# Altium footprint library conn.PcbLib: 101 footprints (part 4 of 7)
Each footprint in its own frame and in the unit in brackets; x right, y up, seen from the top. Pads: shape width x height; smd on the part's side, far side on the other; paste and mask are expansions set on the pad; w line width, h text height; cw(c..) or ccw(c..) is an arc to the next point about the centre after c.
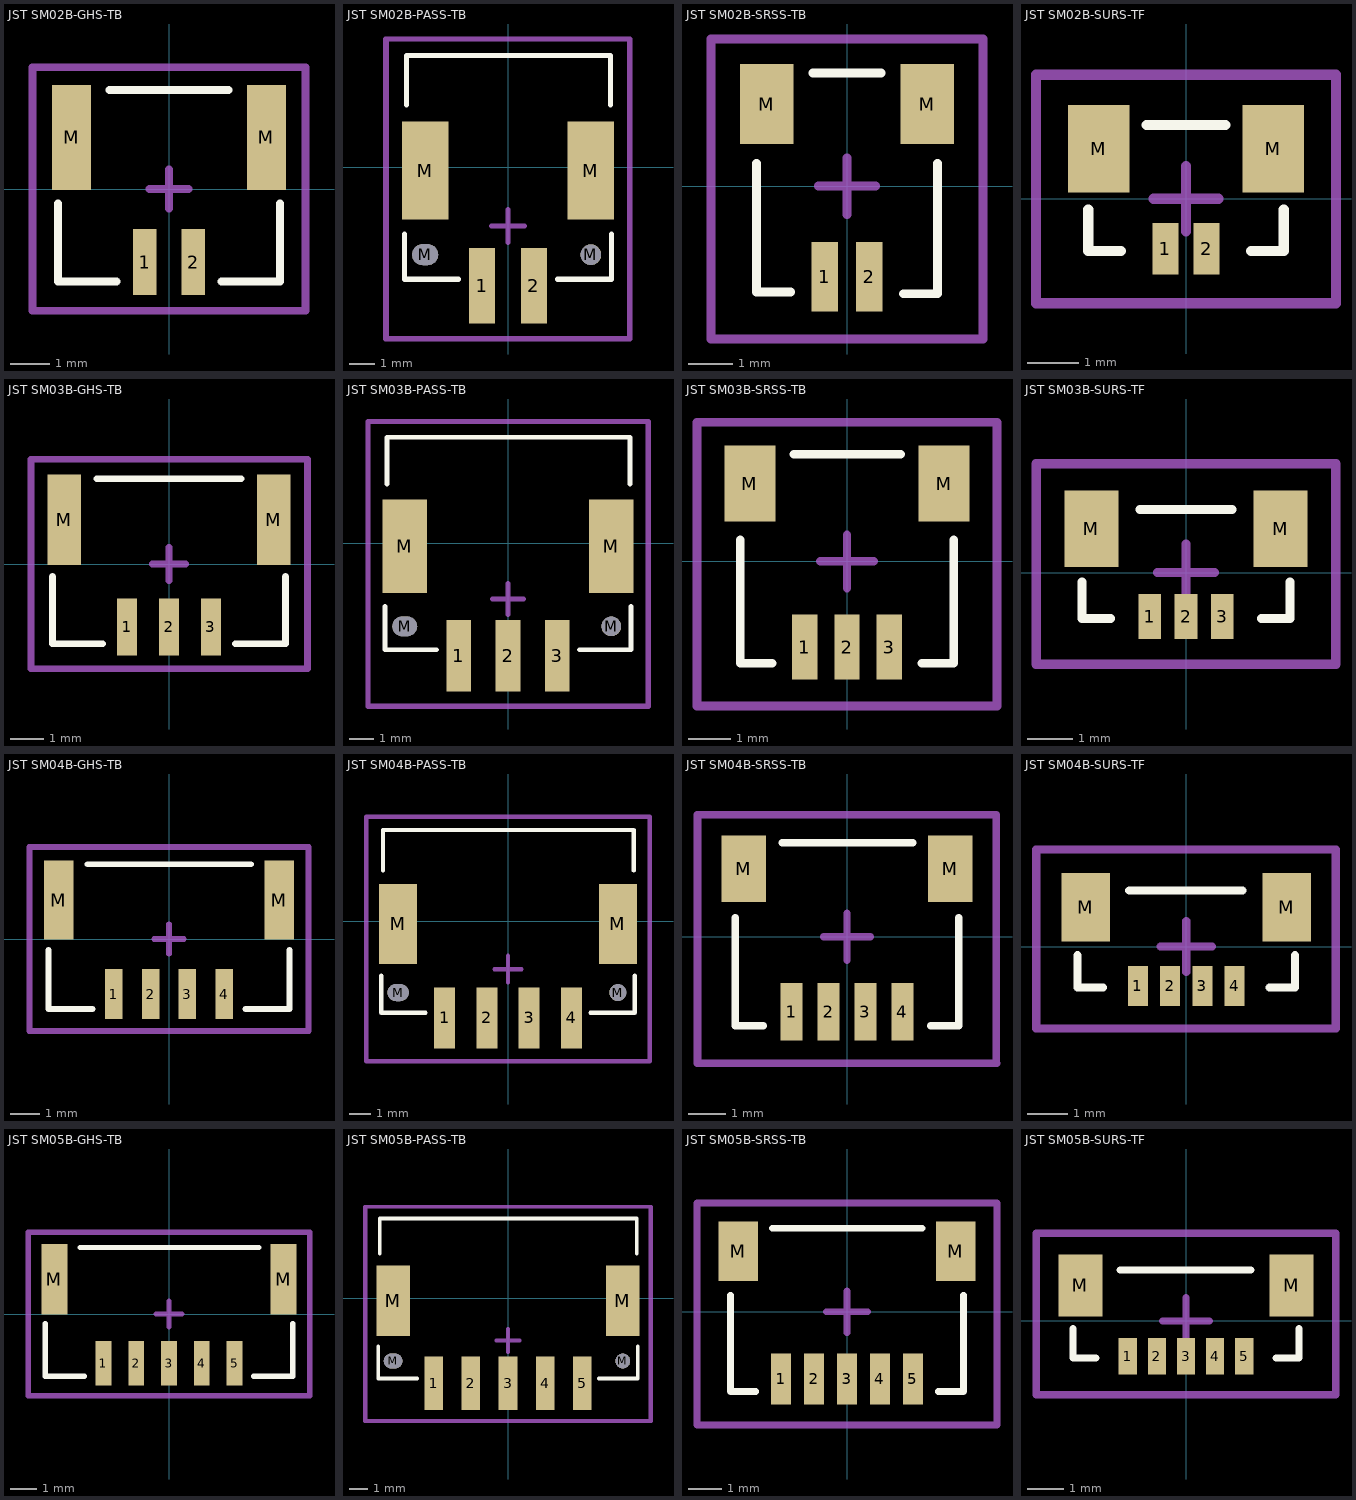
[diagram p3: the footprints below, top view; thin cyan lines are the x and y axes]

## JST SM02B-GHS-TB [mm] "1.25mm pitch/Disconnectable Crimp style connectors"
height 4.35
pads (4):
  rect 0.6x1.7 smd: 1(-0.625,-1.875) 2(0.625,-1.875)
  rect 1x2.7 smd: M(-2.5,1.325) M(2.5,1.325)
Top Overlay:
  lines w0.2: -2.85,-0.375 -2.85,-2.375 -1.35,-2.375 ; -1.524,2.54 1.524,2.54 ; 1.35,-2.375 2.85,-2.375 2.85,-0.375
Top Component:
  lines w0.203: -3.505,-3.124 3.505,-3.124 3.505,3.124 -3.505,3.124 -3.505,-3.124
  text ".Designator" at -0.813,-0.559 h2.03
Component Center:
  lines w0.2: -0.5,0 0.5,0 ; 0,-0.5 0,0.5 ; -3.5,-3.125 3.5,-3.125 3.5,3.125 -3.5,3.125 -3.5,-3.125
3D body "JST SM02B-GHS-TB.STEP": height 4.25, standoff -0.1, extent -2.875,-2.35 2.875,2.5

## JST SM02B-PASS-TB [mm] "JST PA Series 2mm pitch, side entry connector"
height 5.7
pads (6):
  rect 1x2.9 smd: 1(-1,-4.575) 2(1,-4.575)
  oval 1x0.8 hole 0.8 slot 1 at 0 deg unplated mask+0.102: M(-3.2,-3.375)
  rect 1.8x3.8 smd: M(-3.2,-0.125) M(3.2,-0.125)
  round 0.8 hole 0.8 unplated mask+0.102: M(3.2,-3.375)
Top Overlay:
  lines w0.2: -4,-2.575 -4,-4.325 -1.905,-4.325 ; -3.921,2.41 -3.921,4.315 3.953,4.315 3.953,2.41 ; 1.905,-4.325 4,-4.325 4,-2.575
Top Component:
  lines w0.203: -4.724,-6.629 4.699,-6.629 4.699,4.953 -4.724,4.953 -4.724,-6.629
  text ".Designator" at 0.559,-0.813 h2.03
Component Center:
  lines w0.2: -0.635,-2.265 0.635,-2.265 ; 0,-2.9 0,-1.63 ; -4.699,-6.607 -4.699,4.953 4.699,4.953 4.699,-6.607 -4.699,-6.607
3D body "JST SM02B-PASS-TB.STEP": height 5.8, standoff 0, extent -4,-5.641 4,4.359

## JST SM02B-SRSS-TB [mm] "1.0mm pitch/Disconnectable Crimp style connector"
height 2.95
pads (4):
  rect 0.6x1.55 smd: 1(-0.5,-2.032) 2(0.5,-2.032)
  rect 1.2x1.8 smd: M(-1.8,1.843) M(1.8,1.843)
Top Overlay:
  lines w0.2: -2.032,0.508 -2.032,-2.372 -1.27,-2.372 ; -0.762,2.54 0.762,2.54 ; 1.27,-2.413 2.032,-2.413 2.032,0.508
Top Component:
  lines w0.203: -3.048,-3.429 -3.048,3.302 3.048,3.302 3.048,-3.429 -3.048,-3.429
  text ".Designator" at -0.813,-0.559 h2.03
Component Center:
  lines w0.2: -0.635,0 0.635,0 ; 0,-0.635 0,0.635 ; -3.048,-3.429 -3.048,3.302 3.048,3.302 3.048,-3.429 -3.048,-3.429
3D body "JST SM02B-SRSS-TB.STEP": height 2.95, standoff -0.01, extent -2,-2.383 2,2.567

## JST SM02B-SURS-TF [mm] "1.0mm pitch/Disconnectable Crimp style connector"
height 2.95
pads (4):
  rect 0.5x1 smd: 1(-0.4,-0.975) 2(0.4,-0.975)
  rect 1.2x1.7 smd: M(-1.7,0.975) M(1.7,0.975)
Top Overlay:
  lines w0.2: -1.905,-0.213 -1.905,-1.016 -1.27,-1.016 ; -0.762,1.438 0.762,1.438 ; 1.27,-1.016 1.905,-1.016 1.905,-0.213
Top Component:
  lines w0.203: -2.921,-2.032 -2.921,2.413 2.921,2.413 2.921,-2.032 -2.921,-2.032
  text ".Designator" at -0.813,-0.559 h2.03
Component Center:
  lines w0.2: -0.635,0 0.635,0 ; 0,-0.635 0,0.635 ; -2.921,-2.032 -2.921,2.413 2.921,2.413 2.921,-2.032 -2.921,-2.032
3D body "JST SM02B-SURS-TF.STEP": height 1.75, standoff 0, extent -1.9,-1.262 1.9,1.438

## JST SM03B-GHS-TB [mm] "1.25mm pitch/Disconnectable Crimp style connectors"
height 4.35
pads (5):
  rect 0.6x1.7 smd: 1(-1.25,-1.875) 2(0,-1.875) 3(1.25,-1.875)
  rect 1x2.7 smd: M(-3.125,1.325) M(3.125,1.325)
Top Overlay:
  lines w0.2: -3.475,-0.375 -3.475,-2.375 -1.975,-2.375 ; -2.149,2.54 2.159,2.54 ; 1.975,-2.375 3.475,-2.375 3.475,-0.375
Top Component:
  lines w0.203: -4.115,-3.124 4.14,-3.124 4.14,3.124 -4.115,3.124 -4.115,-3.124
  text ".Designator" at -0.813,-0.559 h2.03
Component Center:
  lines w0.2: -0.5,0 0.5,0 ; 0,-0.5 0,0.5 ; -4.125,-3.125 -4.125,3.125 4.125,3.125 4.125,-3.125 -4.125,-3.125
3D body "JST SM03B-GHS-TB.STEP": height 4.35, standoff 0, extent -3.5,-2.31 3.5,2.54

## JST SM03B-PASS-TB [mm] "JST PA Series 2mm pitch, side entry connector"
height 5.7
pads (7):
  rect 1x2.9 smd: 1(-2,-4.575) 2(0,-4.575) 3(2,-4.575)
  oval 1x0.8 hole 0.8 slot 1 at 0 deg unplated mask+0.102: M(-4.2,-3.375)
  rect 1.8x3.8 smd: M(-4.2,-0.125) M(4.2,-0.125)
  round 0.8 hole 0.8 unplated mask+0.102: M(4.2,-3.375)
Top Overlay:
  lines w0.2: -5,-2.575 -5,-4.325 -2.905,-4.325 ; -4.921,2.41 -4.921,4.315 4.953,4.315 4.953,2.41 ; 2.905,-4.325 5,-4.325 5,-2.575
Top Component:
  lines w0.203: -5.69,-6.629 -5.69,4.953 5.715,4.953 5.715,-6.629 -5.69,-6.629
  text ".Designator" at -0.813,-0.559 h2.03
Component Center:
  lines w0.2: -0.635,-2.265 0.635,-2.265 ; 0,-2.9 0,-1.63 ; -5.699,-6.607 -5.699,4.953 5.699,4.953 5.699,-6.607 -5.699,-6.607
3D body "JST SM03B-PASS-TB.STEP": height 5.8, standoff 0, extent -5,-5.641 5,4.359

## JST SM03B-SRSS-TB [mm] "1.0mm pitch/Disconnectable Crimp style connector"
height 2.95
pads (5):
  rect 0.6x1.55 smd: 1(-1,-2.032) 2(0,-2.032) 3(1,-2.032)
  rect 1.2x1.8 smd: M(-2.3,1.843) M(2.3,1.843)
Top Overlay:
  lines w0.2: -2.532,0.508 -2.532,-2.413 -1.77,-2.413 ; -1.262,2.54 1.27,2.54 ; 1.77,-2.413 2.532,-2.413 2.532,0.508
Top Component:
  lines w0.203: -3.556,-3.429 3.556,-3.429 3.556,3.302 -3.556,3.302 -3.556,-3.429
  text ".Designator" at -0.813,-0.559 h2.03
Component Center:
  lines w0.2: -0.635,0 0.635,0 ; 0,-0.635 0,0.635 ; -3.548,-3.429 -3.548,3.302 3.548,3.302 3.548,-3.429 -3.548,-3.429
3D body "JST SM03B-SRSS-TB.STEP": height 2.95, standoff -0.01, extent -2.5,-2.383 2.5,2.567

## JST SM03B-SURS-TF [mm] "1.0mm pitch/Disconnectable Crimp style connector"
height 2.95
pads (5):
  rect 0.5x1 smd: 1(-0.8,-0.975) 2(0,-0.975) 3(0.8,-0.975)
  rect 1.2x1.7 smd: M(-2.1,0.975) M(2.1,0.975)
Top Overlay:
  lines w0.2: -2.305,-0.213 -2.305,-1.016 -1.67,-1.016 ; -1.016,1.397 1.016,1.397 ; 1.67,-1.016 2.305,-1.016 2.305,-0.213
Top Component:
  lines w0.203: -3.327,-2.032 3.327,-2.032 3.327,2.413 -3.327,2.413 -3.327,-2.032
  text ".Designator" at -0.813,-0.559 h2.03
Component Center:
  lines w0.2: -0.635,0 0.635,0 ; 0,-0.635 0,0.635 ; -3.321,-2.032 -3.321,2.413 3.321,2.413 3.321,-2.032 -3.321,-2.032
3D body "JST SM03B-SURS-TF.STEP": height 1.75, standoff 0, extent -2.3,-1.243 2.3,1.457

## JST SM04B-GHS-TB [mm] "1.25mm pitch/Disconnectable Crimp style connectors"
height 4.35
pads (6):
  rect 0.6x1.7 smd: 1(-1.875,-1.875) 2(-0.625,-1.875) 3(0.625,-1.875) 4(1.875,-1.875)
  rect 1x2.7 smd: M(-3.75,1.325) M(3.75,1.325)
Top Overlay:
  lines w0.2: -4.1,-0.375 -4.1,-2.375 -2.6,-2.375 ; -2.774,2.54 2.794,2.54 ; 2.6,-2.375 4.1,-2.375 4.1,-0.375
Top Component:
  lines w0.203: -4.75,-3.124 4.75,-3.124 4.75,3.124 -4.75,3.124 -4.75,-3.124
  text ".Designator" at -0.813,-0.559 h2.03
Component Center:
  lines w0.2: -0.5,0 0.5,0 ; 0,-0.5 0,0.5 ; -4.75,-3.125 -4.75,3.125 4.75,3.125 4.75,-3.125 -4.75,-3.125
3D body "JST SM04B-GHS-TB.STEP": height 4.35, standoff 0, extent -4.125,-2.31 4.125,2.54

## JST SM04B-PASS-TB [mm] "JST PA Series 2mm pitch, side entry connector"
height 5.7
pads (8):
  rect 1x2.9 smd: 1(-3,-4.575) 2(-1,-4.575) 3(1,-4.575) 4(3,-4.575)
  oval 1x0.8 hole 0.8 slot 1 at 0 deg unplated mask+0.102: M(-5.2,-3.375)
  rect 1.8x3.8 smd: M(-5.2,-0.125) M(5.2,-0.125)
  round 0.8 hole 0.8 unplated mask+0.102: M(5.2,-3.375)
Top Overlay:
  lines w0.2: -6,-2.575 -6,-4.325 -3.905,-4.325 ; -5.921,2.41 -5.921,4.315 5.953,4.315 5.953,2.41 ; 3.905,-4.325 6,-4.325 6,-2.575
Top Component:
  lines w0.203: -6.706,-6.629 6.706,-6.629 6.706,4.953 -6.706,4.953 -6.706,-6.629
  text ".Designator" at -0.813,-0.559 h2.03
Component Center:
  lines w0.2: -0.635,-2.265 0.635,-2.265 ; 0,-2.9 0,-1.63 ; 6.68,4.953 -6.699,4.953 -6.699,-6.607 6.699,-6.607 6.699,4.953
3D body "JST SM04B-PASS-TB.STEP": height 5.8, standoff 0, extent -6,-5.641 6,4.359

## JST SM04B-SRSS-TB [mm] "1.0mm pitch/Disconnectable Crimp style connector"
height 2.95
pads (6):
  rect 0.6x1.55 smd: 1(-1.5,-2.032) 2(-0.5,-2.032) 3(0.5,-2.032) 4(1.5,-2.032)
  rect 1.2x1.8 smd: M(-2.8,1.843) M(2.8,1.843)
Top Overlay:
  lines w0.2: -3.032,0.508 -3.032,-2.413 -2.27,-2.413 ; -1.762,2.54 1.778,2.54 ; 2.27,-2.413 3.032,-2.413 3.032,0.508
Top Component:
  lines w0.203: -4.064,-3.429 4.039,-3.429 4.039,3.302 -4.064,3.302 -4.064,-3.429
  text ".Designator" at -0.813,-0.559 h2.03
Component Center:
  lines w0.2: -0.635,0 0.635,0 ; 0,-0.635 0,0.635 ; 4.048,-3.429 4.048,3.302 -4.048,3.302 -4.048,-3.429 4.064,-3.429
3D body "JST SM04B-SRSS-TB.STEP": height 2.95, standoff -0.01, extent -3,-2.383 3,2.567

## JST SM04B-SURS-TF [mm] "1.0mm pitch/Disconnectable Crimp style connector"
height 2.95
pads (6):
  rect 0.5x1 smd: 1(-1.2,-0.975) 2(-0.4,-0.975) 3(0.4,-0.975) 4(1.2,-0.975)
  rect 1.2x1.7 smd: M(-2.5,0.975) M(2.5,0.975)
Top Overlay:
  lines w0.2: -2.705,-0.213 -2.705,-1.016 -2.07,-1.016 ; -1.416,1.397 1.397,1.397 ; 2.07,-1.016 2.705,-1.016 2.705,-0.213
Top Component:
  lines w0.203: -3.734,-2.032 3.708,-2.032 3.708,2.413 -3.734,2.413 -3.734,-2.032
  text ".Designator" at -0.813,-0.559 h2.03
Component Center:
  lines w0.2: -0.635,0 0.635,0 ; 0,-0.635 0,0.635 ; -3.721,-2.032 -3.721,2.413 3.721,2.413 3.721,-2.032 -3.721,-2.032
3D body "JST SM04B-SURS-TF.STEP": height 1.75, standoff 0, extent -2.7,-1.303 2.7,1.397

## JST SM05B-GHS-TB [mm] "1.25mm pitch/Disconnectable Crimp style connectors"
height 4.35
pads (7):
  rect 0.6x1.7 smd: 1(-2.5,-1.875) 2(-1.25,-1.875) 3(0,-1.875) 4(1.25,-1.875) 5(2.5,-1.875)
  rect 1x2.7 smd: M(-4.375,1.325) M(4.375,1.325)
Top Overlay:
  lines w0.2: -4.725,-0.375 -4.725,-2.375 -3.225,-2.375 ; -3.399,2.54 3.429,2.54 ; 3.225,-2.375 4.725,-2.375 4.725,-0.375
Top Component:
  lines w0.203: -5.385,-3.124 5.359,-3.124 5.359,3.124 -5.385,3.124 -5.385,-3.124
  text ".Designator" at -0.813,-0.559 h2.03
Component Center:
  lines w0.2: -0.5,0 0.5,0 ; 0,-0.5 0,0.5 ; -5.375,-3.125 -5.375,3.125 5.375,3.125 5.375,-3.125 -5.375,-3.125
3D body "JST SM05B-GHS-TB.STEP": height 4.35, standoff 0, extent -4.75,-2.31 4.75,2.54

## JST SM05B-PASS-TB [mm] "JST PA Series 2mm pitch, side entry connector"
height 5.7
pads (9):
  rect 1x2.9 smd: 1(-4,-4.575) 2(-2,-4.575) 3(0,-4.575) 4(2,-4.575) 5(4,-4.575)
  oval 1x0.8 hole 0.8 slot 1 at 0 deg unplated mask+0.102: M(-6.2,-3.375)
  rect 1.8x3.8 smd: M(-6.2,-0.125) M(6.2,-0.125)
  round 0.8 hole 0.8 unplated mask+0.102: M(6.2,-3.375)
Top Overlay:
  lines w0.2: -7,-2.575 -7,-4.325 -4.905,-4.325 ; -6.921,2.41 -6.921,4.315 6.953,4.315 6.953,2.41 ; 4.905,-4.325 7,-4.325 7,-2.575
Top Component:
  lines w0.203: -7.722,-6.629 -7.722,4.953 7.722,4.953 7.722,-6.629 -7.722,-6.629
  text ".Designator" at -0.813,-0.559 h2.03
Component Center:
  lines w0.2: -0.635,-2.265 0.635,-2.265 ; 0,-2.9 0,-1.63 ; -7.699,-6.607 -7.699,4.953 7.699,4.953 7.699,-6.607 -7.699,-6.607
3D body "JST SM05B-PASS-TB.STEP": height 5.8, standoff 0, extent -7,-5.641 7,4.359

## JST SM05B-SRSS-TB [mm] "1.0mm pitch/Disconnectable Crimp style connector"
height 2.95
pads (7):
  rect 0.6x1.55 smd: 1(-2,-2.032) 2(-1,-2.032) 3(0,-2.032) 4(1,-2.032) 5(2,-2.032)
  rect 1.2x1.8 smd: M(-3.3,1.843) M(3.3,1.843)
Top Overlay:
  lines w0.2: -3.532,0.508 -3.532,-2.413 -2.77,-2.413 ; -2.262,2.54 2.286,2.54 ; 2.77,-2.413 3.532,-2.413 3.532,0.508
Top Component:
  lines w0.203: -4.547,-3.429 -4.547,3.302 4.547,3.302 4.547,-3.429 -4.547,-3.429
  text ".Designator" at -1.803,-0.559 h2.03
Component Center:
  lines w0.2: -0.635,0 0.635,0 ; 0,-0.635 0,0.635 ; -4.548,-3.429 -4.548,3.302 4.548,3.302 4.548,-3.429 -4.548,-3.429
3D body "JST SM05B-SRSS-TB.STEP": height 2.95, standoff -0.01, extent -3.5,-2.383 3.5,2.567

## JST SM05B-SURS-TF [mm] "1.0mm pitch/Disconnectable Crimp style connector"
height 2.95
pads (7):
  rect 0.5x1 smd: 1(-1.6,-0.975) 2(-0.8,-0.975) 3(0,-0.975) 4(0.8,-0.975) 5(1.6,-0.975)
  rect 1.2x1.7 smd: M(-2.9,0.975) M(2.9,0.975)
Top Overlay:
  lines w0.2: -3.105,-0.213 -3.105,-1.016 -2.47,-1.016 ; -1.816,1.397 1.778,1.397 ; 2.47,-1.016 3.105,-1.016 3.105,-0.213
Top Component:
  lines w0.203: -4.115,-2.032 4.115,-2.032 4.115,2.413 -4.115,2.413 -4.115,-2.032
  text ".Designator" at -0.813,-0.584 h2.03
Component Center:
  lines w0.2: -0.635,0 0.635,0 ; 0,-0.635 0,0.635 ; -4.121,-2.032 -4.121,2.413 4.121,2.413 4.121,-2.032 -4.121,-2.032
3D body "JST SM05B-SURS-TF.STEP": height 1.75, standoff 0, extent -3.1,-1.303 3.1,1.397